# Altium integrated library SAMTEC-A-TSM-103-01-L-SH.IntLib: 1 symbol
Pins are listed as number, name and electrical type; pins without a type are passive.

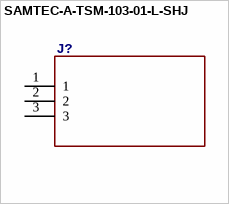
[diagram p0: symbol SAMTEC-A-TSM-103-01-L-SHJ]

## SAMTEC-A-TSM-103-01-L-SHJ
designator J?
footprint SAMTEC-A-TSM-103-01-L-SH
pins: 1, 2, 3